# Altium footprint library Opam-Comp..$.PcbLib: 14 footprints
Each footprint in its own frame and in the unit in brackets; x right, y up, seen from the top. Pads: shape width x height; smd on the part's side, far side on the other; paste and mask are expansions set on the pad; w line width, h text height; cw(c..) or ccw(c..) is an arc to the next point about the centre after c.
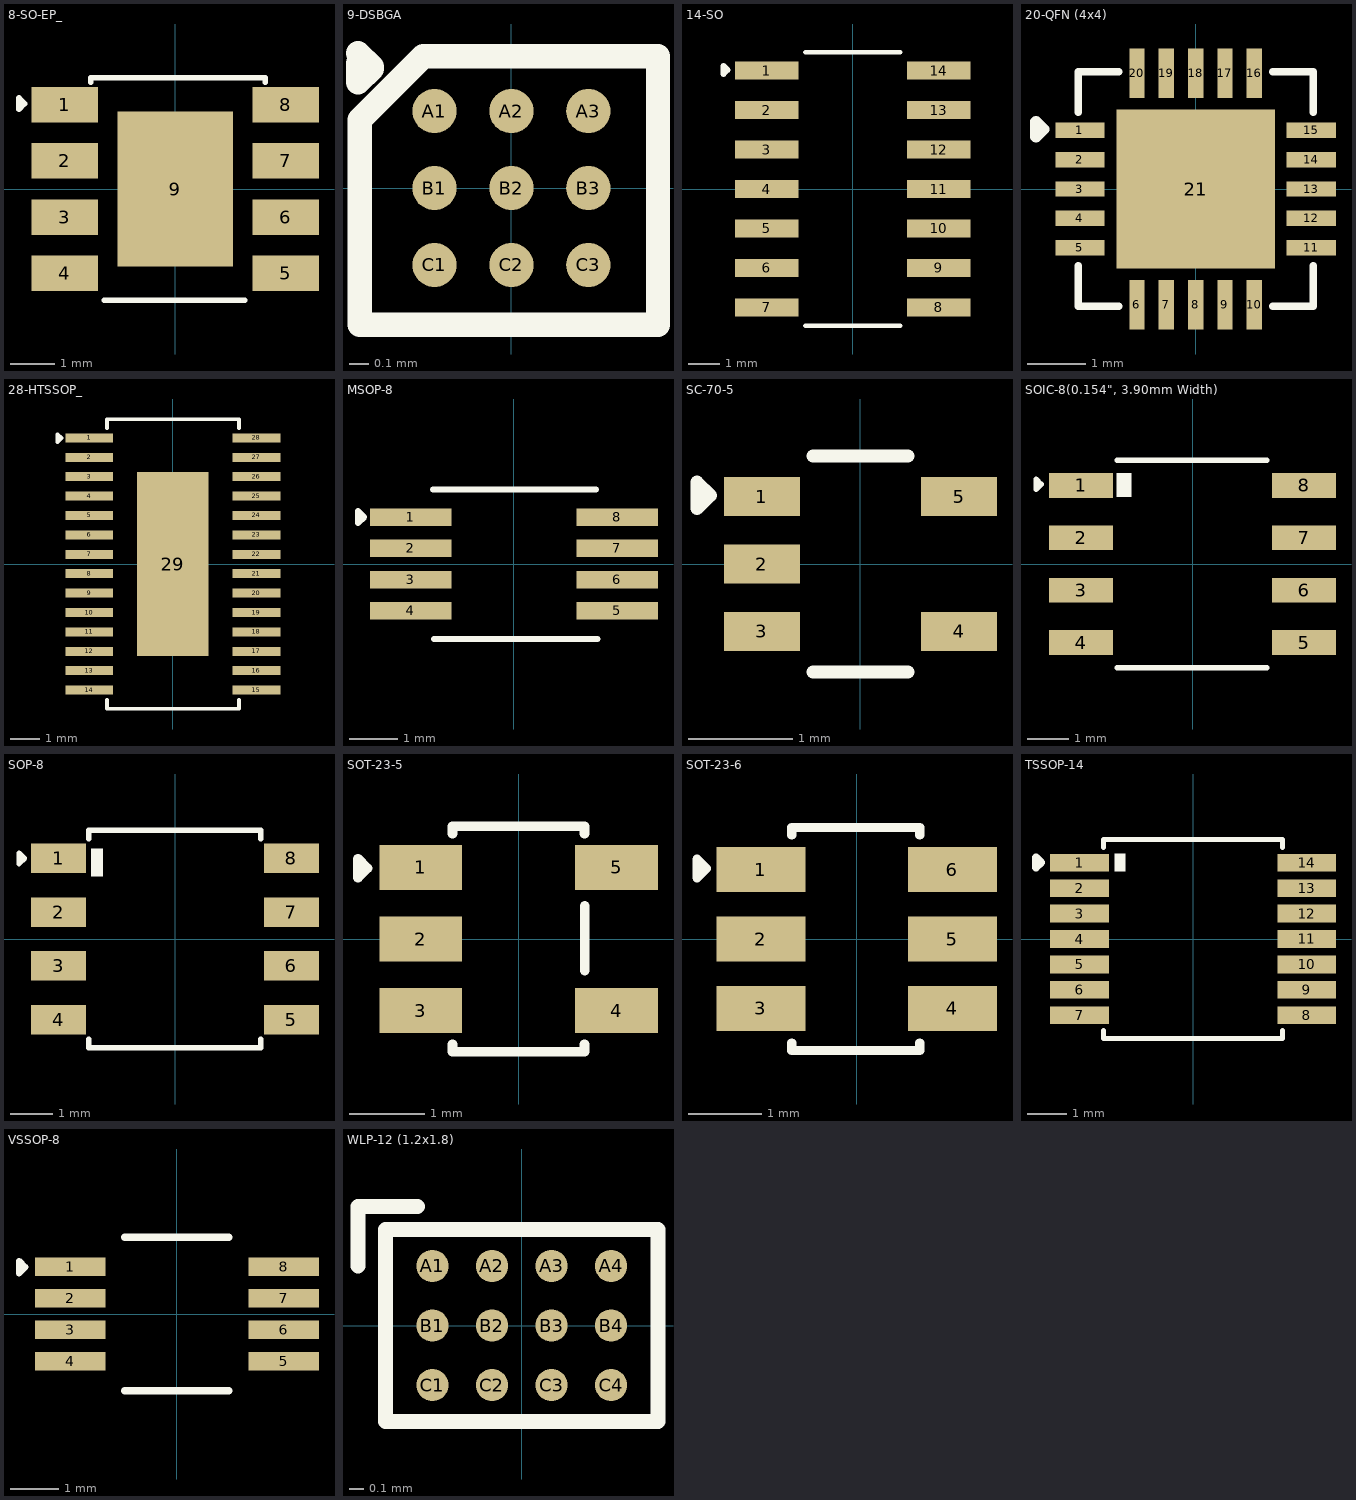
[diagram p0: the footprints below, top view; thin cyan lines are the x and y axes]

## 8-SO-EP_ [mm]
pads (9):
  rect 1.505x0.802 smd: 1(-2.497,1.905) 2(-2.497,0.635) 3(-2.497,-0.635) 4(-2.497,-1.905) 5(2.498,-1.905) 6(2.498,-0.635) 7(2.498,0.635) 8(2.498,1.905)
  rect 2.613x3.502 smd: 9(0,0)
Top Overlay:
  lines w0.127: -1.905,2.413 -1.905,2.515 2.032,2.515 2.032,2.413 ; -1.6,-2.515 1.575,-2.515 ; -3.531,1.803 -3.404,1.93 -3.531,2.057 -3.531,1.803
3D body "AP64501SP-13.STEP": height 1.7, standoff 0, extent -3,-2.45 3,2.45

## 9-DSBGA [mm]
pads (9):
  round 0.23 smd mask+0.055: A1(-0.4,0.4) A2(0,0.4) A3(0.4,0.4) B1(-0.4,0) B2(0,0) B3(0.4,0) C1(-0.4,-0.4) C2(0,-0.4) C3(0.4,-0.4)
Top Overlay:
  lines w0.127: -0.797,0.649 -0.797,0.549 -0.727,0.62 ; -0.797,0.701 -0.727,0.631 ; -0.787,-0.711 -0.787,0.356 -0.457,0.686 0.762,0.686 0.762,-0.711 -0.787,-0.711
3D body "TPA2011D1YFFR.STEP": height 0.63, standoff 0, extent -0.734,-0.666 0.734,0.666

## 14-SO [mm]
pads (14):
  rect 2.038x0.574 smd: 1(-2.769,3.81) 2(-2.769,2.54) 3(-2.769,1.27) 4(-2.769,0) 5(-2.769,-1.27) 6(-2.769,-2.54) 7(-2.769,-3.81) 8(2.769,-3.81) 9(2.769,-2.54) 10(2.769,-1.27) 11(2.769,0) 12(2.769,1.27) 13(2.769,2.54) 14(2.769,3.81)
Top Overlay:
  lines w0.152: -1.521,-4.401 1.521,-4.401 ; -1.521,4.401 1.521,4.401
  lines w0.2: -4.166,3.708 -4.166,3.962 -4.039,3.835 -4.166,3.708
3D body "LM324DT.step": height 1.75, standoff 0, extent -3,-4.325 3,4.325

## 20-QFN (4x4) [mm]
pads (21):
  rect 0.84x0.26 smd: 1(-1.97,1) 2(-1.97,0.5) 3(-1.97,0) 4(-1.97,-0.5) 5(-1.97,-1) 11(1.97,-1) 12(1.97,-0.5) 13(1.97,0) 14(1.97,0.5) 15(1.97,1)
  rect 0.26x0.84 smd: 6(-1,-1.97) 7(-0.5,-1.97) 8(0,-1.97) 9(0.5,-1.97) 10(1,-1.97) 16(1,1.97) 17(0.5,1.97) 18(0,1.97) 19(-0.5,1.97) 20(-1,1.97)
  rect 2.7x2.7 smd: 21(0,0)
Top Overlay:
  lines w0.127: -2,-1.31 -2,-2 -1.31,-2 ; -2,1.31 -2,2 -1.31,2 ; 1.31,-2 2,-2 2,-1.31 ; 1.31,2 2,2 2,1.31
  lines w0.2: -2.718,0.889 -2.591,1.016 -2.718,1.143 -2.718,0.889
3D body "RTJ0020D.stp": height 0.8, standoff 0, extent -2,-2 2,2

## 28-HTSSOP_ [mm]
pads (29):
  rect 1.6x0.3 smd: 1(-2.8,4.225) 2(-2.8,3.575) 3(-2.8,2.925) 4(-2.8,2.275) 5(-2.8,1.625) 6(-2.8,0.975) 7(-2.8,0.325) 8(-2.8,-0.325) 9(-2.8,-0.975) 10(-2.8,-1.625) 11(-2.8,-2.275) 12(-2.8,-2.925) 13(-2.8,-3.575) 14(-2.8,-4.225) 15(2.8,-4.225) 16(2.8,-3.575) 17(2.8,-2.925) 18(2.8,-2.275) 19(2.8,-1.625) 20(2.8,-0.975) 21(2.8,-0.325) 22(2.8,0.325) 23(2.8,0.975) 24(2.8,1.625) 25(2.8,2.275) 26(2.8,2.925) 27(2.8,3.575) 28(2.8,4.225)
  rect 2.4x6.17 smd: 29(0,0)
Top Overlay:
  lines w0.127: -2.21,-4.547 -2.21,-4.851 2.21,-4.851 2.21,-4.547 ; -2.21,4.547 -2.21,4.851 2.21,4.851 2.21,4.547 ; -3.861,4.089 -3.734,4.216 -3.861,4.343 -3.861,4.089
3D body "TPA3111D1PWPR.STEP": height 1.2, standoff 0, extent -3.2,-4.85 3.2,4.85

## MSOP-8 [mm]
pads (8):
  rect 1.692x0.364 smd paste+0 mask+0.051: 1(-2.146,0.975) 2(-2.146,0.325) 3(-2.146,-0.325) 4(-2.146,-0.975) 5(2.146,-0.975) 6(2.146,-0.325) 7(2.146,0.325) 8(2.146,0.975)
Top Overlay:
  lines w0.127: -1.676,1.548 1.7,1.548 ; -1.658,-1.557 1.731,-1.557 ; -3.238,0.848 -3.238,1.102 -3.111,0.975 -3.238,0.848
3D body "C12086.step": height 1, standoff 0, extent -2.5,-1.5 2.5,1.5

## SC-70-5 [mm]
pads (5):
  rect 0.73x0.38 smd: 1(-0.95,0.65) 2(-0.95,0) 3(-0.95,-0.65) 4(0.95,-0.65) 5(0.95,0.65)
Top Overlay:
  lines w0.127: -0.457,-1.041 0.457,-1.041 ; -0.457,1.041 0.457,1.041 ; -1.575,0.533 -1.575,0.787 -1.448,0.66 -1.575,0.533
3D body "User Library-SC70-5-1.step": height 0.95, standoff 0, extent -1.05,-1 1.05,1

## SOIC-8(0.154", 3.90mm Width) [mm]
pads (8):
  rect 1.55x0.6 smd: 1(-2.7,1.905) 2(-2.7,0.635) 3(-2.7,-0.635) 4(-2.7,-1.905) 5(2.7,-1.905) 6(2.7,-0.635) 7(2.7,0.635) 8(2.7,1.905)
Top Overlay:
  rectangle: -1.838,1.626 -1.483,2.21
  lines w0.127: -1.829,-2.515 1.803,-2.515 ; -1.829,2.515 1.803,2.515 ; -3.794,1.803 -3.794,2.057 -3.667,1.93 -3.794,1.803
3D body "D0008A.stp": height 1.63, standoff 0, extent -3.011,-2.451 3.011,2.451

## SOP-8 [mm]
pads (8):
  rect 1.3x0.7 smd: 1(-2.75,1.905) 2(-2.75,0.635) 3(-2.75,-0.635) 4(-2.75,-1.905) 5(2.75,-1.905) 6(2.75,-0.635) 7(2.75,0.635) 8(2.75,1.905)
Top Overlay:
  rectangle: -1.981,1.473 -1.702,2.134
  lines w0.127: -2.036,-2.362 -2.036,-2.565 2.028,-2.565 2.028,-2.362 ; -2.036,2.362 -2.036,2.565 2.028,2.565 2.028,2.362 ; -3.687,1.778 -3.56,1.905 -3.687,2.032 -3.687,1.778
3D body "TRANS_IRF7103TRPBF_INF.step": height 1.76, standoff 0, extent -3.099,-2.502 3.099,2.502

## SOT-23-5 [mm]
pads (5):
  rect 1.1x0.6 smd: 1(-1.3,0.95) 2(-1.3,0) 3(-1.3,-0.95) 4(1.3,-0.95) 5(1.3,0.95)
Top Overlay:
  lines w0.127: -0.879,-1.399 -0.879,-1.499 0.874,-1.499 0.874,-1.399 ; -0.879,1.399 -0.879,1.499 0.874,1.499 0.874,1.399 ; 0.88,-0.418 0.88,0.44 ; -2.134,0.813 -2.134,1.067 -2.007,0.94 -2.134,0.813
3D body "SN74LV1T34DBVR.STEP": height 1.45, standoff 0, extent -1.4,-1.45 1.4,1.45

## SOT-23-6 [mm]
pads (6):
  rect 1.22x0.62 smd: 1(-1.31,0.95) 2(-1.31,0) 3(-1.31,-0.95) 4(1.31,-0.95) 5(1.31,0) 6(1.31,0.95)
Top Overlay:
  lines w0.127: -0.889,-1.424 -0.889,-1.524 0.864,-1.524 0.864,-1.424 ; -0.889,1.424 -0.889,1.524 0.864,1.524 0.864,1.424 ; -2.184,0.838 -2.184,1.092 -2.057,0.965 -2.184,0.838
3D body "21-0058I_MXM.step": height 1.47, standoff 0.02, extent -1.499,-1.499 1.499,1.499

## TSSOP-14 [mm]
pads (14):
  rect 1.5x0.45 smd: 1(-2.9,1.95) 2(-2.9,1.3) 3(-2.9,0.65) 4(-2.9,0) 5(-2.9,-0.65) 6(-2.9,-1.3) 7(-2.9,-1.95) 8(2.9,-1.95) 9(2.9,-1.3) 10(2.9,-0.65) 11(2.9,0) 12(2.9,0.65) 13(2.9,1.3) 14(2.9,1.95)
Top Overlay:
  rectangle: -2.005,1.727 -1.725,2.184
  lines w0.127: -2.284,-2.337 -2.284,-2.54 2.288,-2.54 2.288,-2.337 ; -2.284,2.337 -2.284,2.54 2.288,2.54 2.288,2.337
  lines w0.2: -4.011,1.829 -4.011,2.083 -3.884,1.956 -4.011,1.829
3D body "User Library-TSSOP-14.STEP": height 1.2, standoff 0, extent -3.2,-2.5 3.2,2.5

## VSSOP-8 [mm]
pads (8):
  rect 1.45x0.38 smd: 1(-2.2,0.975) 2(-2.2,0.325) 3(-2.2,-0.325) 4(-2.2,-0.975) 5(2.2,-0.975) 6(2.2,-0.325) 7(2.2,0.325) 8(2.2,0.975)
Top Overlay:
  lines w0.127: -3.251,0.838 -3.124,0.965 -3.251,1.092 -3.251,0.838
  lines w0.152: -1.071,-1.576 1.071,-1.576 ; -1.071,1.576 1.071,1.576
3D body "LM7332MMX_NOPB.step": height 1.1, standoff 0, extent -2.45,-1.5 2.45,1.5

## WLP-12 (1.2x1.8) [mm]
pads (12):
  round 0.216 smd paste-100 mask+0.05: A1(-0.6,0.4) A2(-0.2,0.4) A3(0.2,0.4) A4(0.6,0.4) B1(-0.6,0) B2(-0.2,0) B3(0.2,0) B4(0.6,0) C1(-0.6,-0.4) C2(-0.2,-0.4) C3(0.2,-0.4) C4(0.6,-0.4)
Top Overlay:
  lines w0.1: -1.1,0.4 -1.1,0.8 -0.7,0.8 ; -0.915,-0.645 -0.915,0.645 0.915,0.645 0.915,-0.645 -0.915,-0.645
Top Paste:
  drawing of 12 lines, arcs and shapes, not listed